# Altium integrated library Altium_PCB_Connector.IntLib: 246 symbols (part 4 of 5)
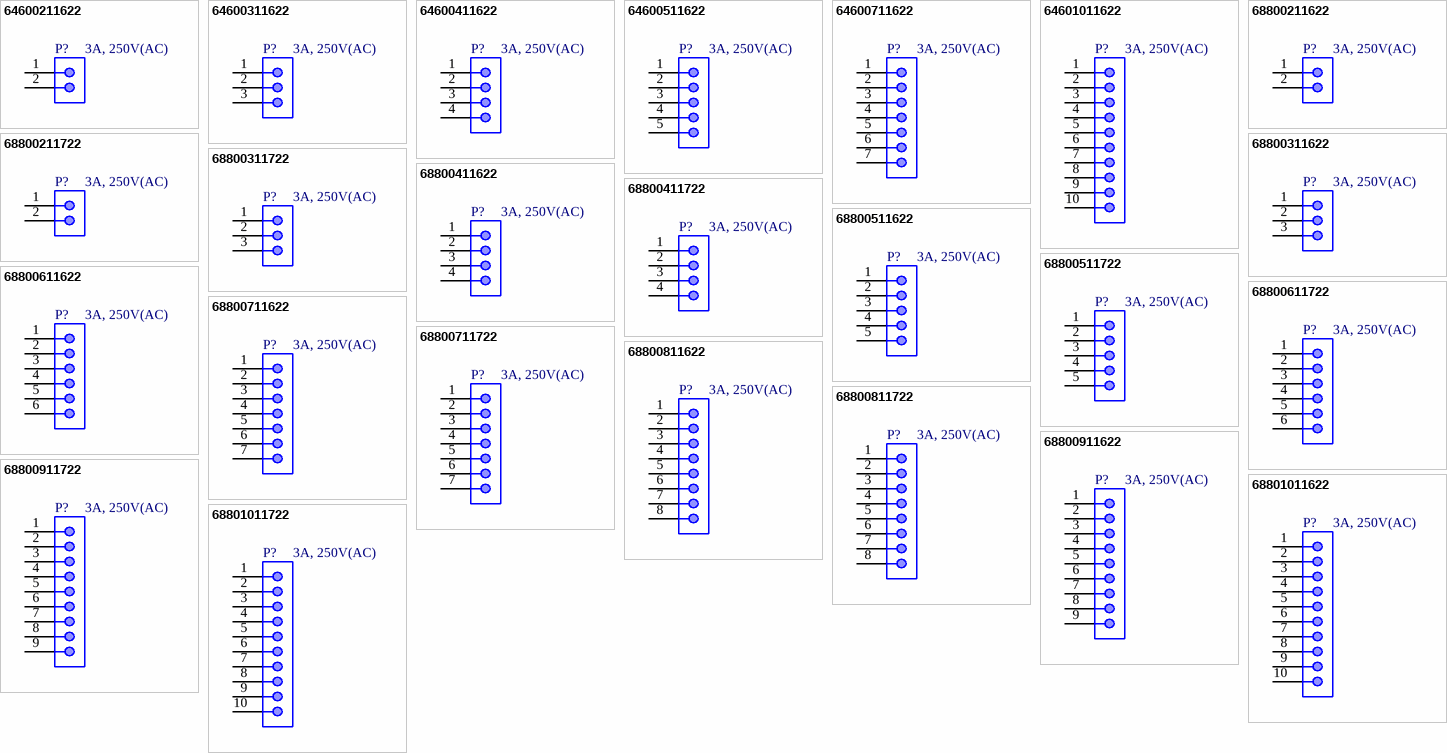
[diagram p12: symbols 64600211622 to 68801011722]

## 68800611622
designator P?, comment 3A, 250V(AC)
WR-WTB “J” Type THT Vertical Male Shrouded Header, pitch 2.5mm, 6p; Manufacturer: Wurth Elektronik; Manufacturer Part Number: 68800611622; Pin Number: 6; Contact Resistance: 20mOhm; Withstanding Voltage: 800VAC; Working Voltage: 250VAC; ComponentLink1Description: Datasheet; ComponentLink1URL: https://www.we-online.com/catalog/datasheet/68800611622.pdf; Pitch: 2.5mm; Packaging: Bag; Gender: Male; Type: Vertical; Rated Current: 3A; Supplier 1 URL: N/A; Supplier 2 URL: N/A; Supplier 3 URL: N/A; Value: 3A, 250V(AC); LCSC Part #: N/A; Mount: THT; Operating Temperature Max: + 85 C; Operating Temperature Min: - 25 C; Package / Case: 6; Supplier 1: Mouser; Supplier 1 Part Number: N/A; Supplier 2: Digi-Key; Supplier 2 Part Number: N/A; Supplier 3: thegioiic; Supplier 3 Part Number: N/A
footprint 68800611622
pins: 1, 2, 3, 4, 5, 6

## 68800611722
designator P?, comment 3A, 250V(AC)
WR-WTB “J” Type THT Male Horizontal Shrouded Header, pitch 2.5mm, 6p; Manufacturer: Wurth Elektronik; Manufacturer Part Number: 68800611722; Pin Number: 6; Contact Resistance: 20mOhm; Withstanding Voltage: 800VAC; Working Voltage: 250VAC; ComponentLink1Description: Datasheet; ComponentLink1URL: https://www.we-online.com/catalog/datasheet/68800611722.pdf; Pitch: 2.5mm; Packaging: Bag; Gender: Male; Type: Horizontal; Rated Current: 3A; Supplier 1 URL: N/A; Supplier 2 URL: N/A; Supplier 3 URL: N/A; Value: 3A, 250V(AC); LCSC Part #: N/A; Mount: THT; Operating Temperature Max: + 85 C; Operating Temperature Min: - 25 C; Package / Case: 6; Supplier 1: Mouser; Supplier 1 Part Number: N/A; Supplier 2: Digi-Key; Supplier 2 Part Number: N/A; Supplier 3: thegioiic; Supplier 3 Part Number: N/A
footprint 68800611722
pins: 1, 2, 3, 4, 5, 6

## 68800711622
designator P?, comment 3A, 250V(AC)
WR-WTB “J” Type THT Vertical Male Shrouded Header, pitch 2.5mm, 7p; Manufacturer: Wurth Elektronik; Manufacturer Part Number: 68800711622; Pin Number: 7; Contact Resistance: 20mOhm; Withstanding Voltage: 800VAC; Working Voltage: 250VAC; ComponentLink1Description: Datasheet; ComponentLink1URL: https://www.we-online.com/catalog/datasheet/68800711622.pdf; Pitch: 2.5mm; Packaging: Bag; Gender: Male; Type: Vertical; Rated Current: 3A; Supplier 1 URL: https://www.mouser.vn/ProductDetail/Wurth-Elektronik/68800711622?qs=3RJ0PdSuLVnWMCM6M3V0SA%3D%3D; Supplier 2 URL: N/A; Supplier 3 URL: N/A; Value: 3A, 250V(AC); LCSC Part #: N/A; Mount: THT; Operating Temperature Max: + 85 C; Operating Temperature Min: - 25 C; Package / Case: 7; Supplier 1: Mouser; Supplier 1 Part Number: 710-68800711622; Supplier 2: Digi-Key; Supplier 2 Part Number: N/A; Supplier 3: thegioiic; Supplier 3 Part Number: N/A
footprint 68800711622
pins: 1, 2, 3, 4, 5, 6, 7

## 68800711722
designator P?, comment 3A, 250V(AC)
WR-WTB “J” Type THT Male Horizontal Shrouded Header, pitch 2.5mm, 7p; Manufacturer: Wurth Elektronik; Manufacturer Part Number: 68800711722; Pin Number: 7; Contact Resistance: 20mOhm; Withstanding Voltage: 800VAC; Working Voltage: 250VAC; ComponentLink1Description: Datasheet; ComponentLink1URL: https://www.we-online.com/catalog/datasheet/68800711722.pdf; Pitch: 2.5mm; Packaging: Bag; Gender: Male; Type: Horizontal; Rated Current: 3A; Supplier 1 URL: N/A; Supplier 2 URL: N/A; Supplier 3 URL: N/A; Value: 3A, 250V(AC); LCSC Part #: N/A; Mount: THT; Operating Temperature Max: + 85 C; Operating Temperature Min: - 25 C; Package / Case: 7; Supplier 1: Mouser; Supplier 1 Part Number: N/A; Supplier 2: Digi-Key; Supplier 2 Part Number: N/A; Supplier 3: thegioiic; Supplier 3 Part Number: N/A
footprint 68800711722
pins: 1, 2, 3, 4, 5, 6, 7

## 68800811622
designator P?, comment 3A, 250V(AC)
WR-WTB “J” Type THT Vertical Male Shrouded Header, pitch 2.5mm, 8p; Manufacturer: Wurth Elektronik; Manufacturer Part Number: 68800811622; Pin Number: 8; Contact Resistance: 20mOhm; Withstanding Voltage: 800VAC; Working Voltage: 250VAC; ComponentLink1Description: Datasheet; ComponentLink1URL: https://www.we-online.com/catalog/datasheet/68800811622.pdf; Pitch: 2.5mm; Packaging: Bag; Gender: Male; Type: Vertical; Rated Current: 3A; Supplier 1 URL: N/A; Supplier 2 URL: N/A; Supplier 3 URL: N/A; Value: 3A, 250V(AC); LCSC Part #: N/A; Mount: THT; Operating Temperature Max: + 85 C; Operating Temperature Min: - 25 C; Package / Case: 8; Supplier 1: Mouser; Supplier 1 Part Number: N/A; Supplier 2: Digi-Key; Supplier 2 Part Number: N/A; Supplier 3: thegioiic; Supplier 3 Part Number: N/A
footprint 68800811622
pins: 1, 2, 3, 4, 5, 6, 7, 8

## 68800811722
designator P?, comment 3A, 250V(AC)
WR-WTB “J” Type THT Male Horizontal Shrouded Header, pitch 2.5mm, 8p; Manufacturer: Wurth Elektronik; Manufacturer Part Number: 68800811722; Pin Number: 8; Contact Resistance: 20mOhm; Withstanding Voltage: 800VAC; Working Voltage: 250VAC; ComponentLink1Description: Datasheet; ComponentLink1URL: https://www.we-online.com/catalog/datasheet/68800811722.pdf; Pitch: 2.5mm; Packaging: Bag; Gender: Male; Type: Horizontal; Rated Current: 3A; Supplier 1 URL: N/A; Supplier 2 URL: N/A; Supplier 3 URL: N/A; Value: 3A, 250V(AC); LCSC Part #: N/A; Mount: THT; Operating Temperature Max: + 85 C; Operating Temperature Min: - 25 C; Package / Case: 8; Supplier 1: Mouser; Supplier 1 Part Number: N/A; Supplier 2: Digi-Key; Supplier 2 Part Number: N/A; Supplier 3: thegioiic; Supplier 3 Part Number: N/A
footprint 68800811722
pins: 1, 2, 3, 4, 5, 6, 7, 8

## 68800911622
designator P?, comment 3A, 250V(AC)
WR-WTB “J” Type THT Vertical Male Shrouded Header, pitch 2.5mm, 9p; Manufacturer: Wurth Elektronik; Manufacturer Part Number: 68800911622; Pin Number: 9; Contact Resistance: 20mOhm; Withstanding Voltage: 800VAC; Working Voltage: 250VAC; ComponentLink1Description: Datasheet; ComponentLink1URL: https://www.we-online.com/catalog/datasheet/68800911622.pdf; Pitch: 2.5mm; Packaging: Bag; Gender: Male; Type: Vertical; Rated Current: 3A; Supplier 1 URL: N/A; Supplier 2 URL: N/A; Supplier 3 URL: N/A; Value: 3A, 250V(AC); LCSC Part #: N/A; Mount: THT; Operating Temperature Max: + 85 C; Operating Temperature Min: - 25 C; Package / Case: 9; Supplier 1: Mouser; Supplier 1 Part Number: N/A; Supplier 2: Digi-Key; Supplier 2 Part Number: N/A; Supplier 3: thegioiic; Supplier 3 Part Number: N/A
footprint 68800911622
pins: 1, 2, 3, 4, 5, 6, 7, 8, 9

## 68800911722
designator P?, comment 3A, 250V(AC)
WR-WTB “J” Type THT Male Horizontal Shrouded Header, pitch 2.5mm, 9p; Manufacturer: Wurth Elektronik; Manufacturer Part Number: 68800911722; Pin Number: 9; Contact Resistance: 20mOhm; Withstanding Voltage: 800VAC; Working Voltage: 250VAC; ComponentLink1Description: Datasheet; ComponentLink1URL: https://www.we-online.com/catalog/datasheet/68800911722.pdf; Pitch: 2.5mm; Packaging: Bag; Gender: Male; Type: Horizontal; Rated Current: 3A; Supplier 1 URL: N/A; Supplier 2 URL: N/A; Supplier 3 URL: N/A; Value: 3A, 250V(AC); LCSC Part #: N/A; Mount: THT; Operating Temperature Max: + 85 C; Operating Temperature Min: - 25 C; Package / Case: 9; Supplier 1: Mouser; Supplier 1 Part Number: N/A; Supplier 2: Digi-Key; Supplier 2 Part Number: N/A; Supplier 3: thegioiic; Supplier 3 Part Number: N/A
footprint 68800911722
pins: 1, 2, 3, 4, 5, 6, 7, 8, 9

## 68801011622
designator P?, comment 3A, 250V(AC)
WR-WTB “J” Type THT Vertical Male Shrouded Header, pitch 2.5mm, 10p; Manufacturer: Wurth Elektronik; Manufacturer Part Number: 68801011622; Pin Number: 10; Contact Resistance: 20mOhm; Withstanding Voltage: 800VAC; Working Voltage: 250VAC; ComponentLink1Description: Datasheet; ComponentLink1URL: https://www.we-online.com/catalog/datasheet/68801011622.pdf; Pitch: 2.5mm; Packaging: Bag; Gender: Male; Type: Vertical; Rated Current: 3A; Supplier 1 URL: N/A; Supplier 2 URL: N/A; Supplier 3 URL: N/A; Value: 3A, 250V(AC); LCSC Part #: N/A; Mount: THT; Operating Temperature Max: + 85 C; Operating Temperature Min: - 25 C; Package / Case: 10; Supplier 1: Mouser; Supplier 1 Part Number: N/A; Supplier 2: Digi-Key; Supplier 2 Part Number: N/A; Supplier 3: thegioiic; Supplier 3 Part Number: N/A
footprint 68801011622
pins: 1, 2, 3, 4, 5, 6, 7, 8, 9, 10

## 68801011722
designator P?, comment 3A, 250V(AC)
WR-WTB “J” Type THT Male Horizontal Shrouded Header, pitch 2.5mm, 10p; Manufacturer: Wurth Elektronik; Manufacturer Part Number: 68801011722; Pin Number: 10; Contact Resistance: 20mOhm; Withstanding Voltage: 800VAC; Working Voltage: 250VAC; ComponentLink1Description: Datasheet; ComponentLink1URL: https://www.we-online.com/catalog/datasheet/68801011722.pdf; Pitch: 2.5mm; Packaging: Bag; Gender: Male; Type: Horizontal; Rated Current: 3A; Supplier 1 URL: N/A; Supplier 2 URL: N/A; Supplier 3 URL: N/A; Value: 3A, 250V(AC); LCSC Part #: N/A; Mount: THT; Operating Temperature Max: + 85 C; Operating Temperature Min: - 25 C; Package / Case: 10; Supplier 1: Mouser; Supplier 1 Part Number: N/A; Supplier 2: Digi-Key; Supplier 2 Part Number: N/A; Supplier 3: thegioiic; Supplier 3 Part Number: N/A
footprint 68801011722
pins: 1, 2, 3, 4, 5, 6, 7, 8, 9, 10


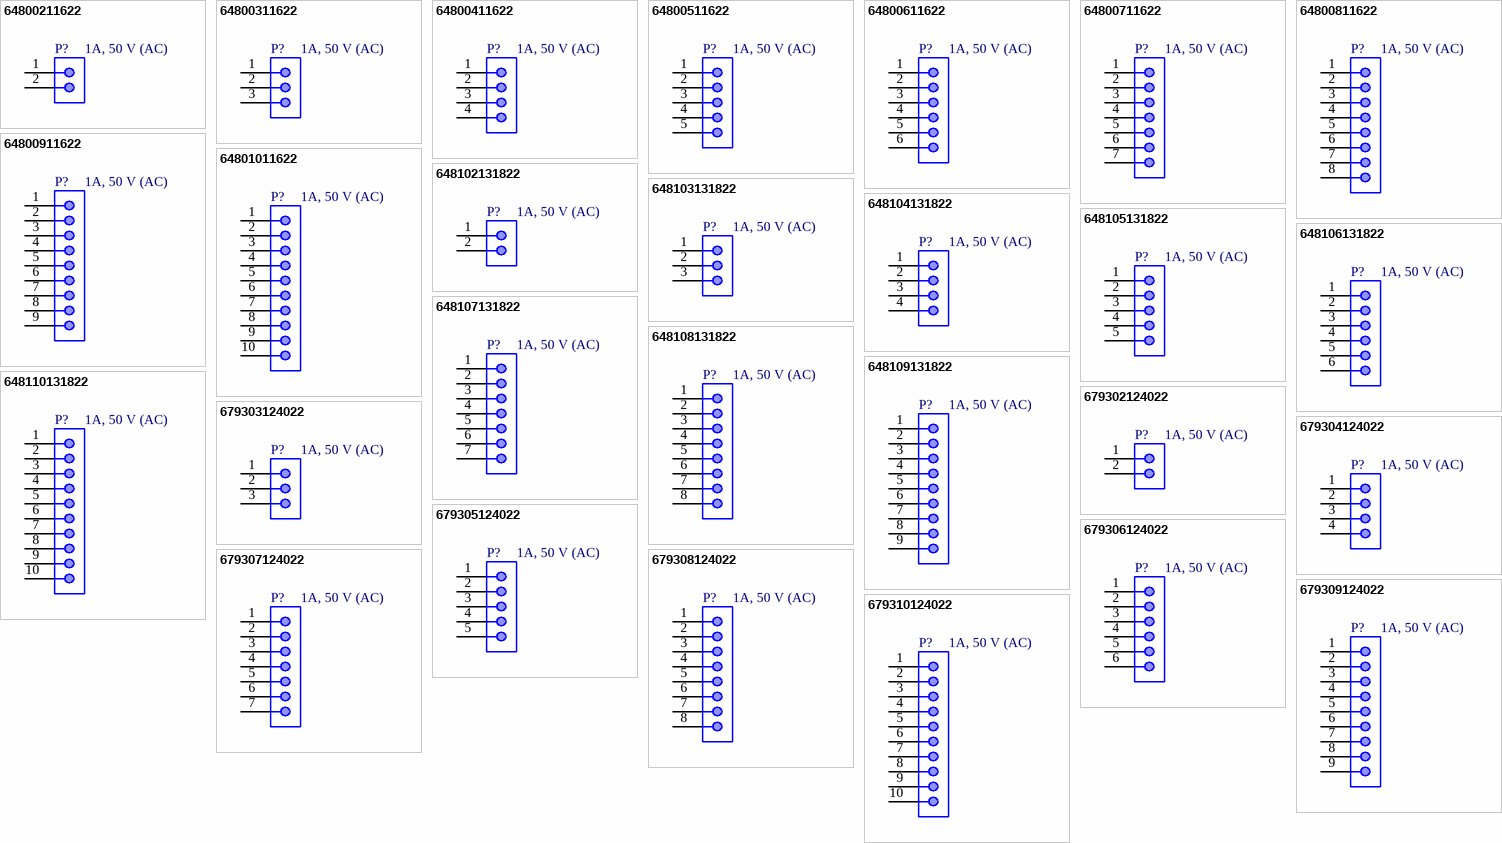
[diagram p6: symbols 64800211622 to 679310124022]

## 64800211622
designator P?, comment 1A, 50 V (AC)
WR-WTB THT Male Vertical Shrouded Header, pitch 1.5mm, 2p; Manufacturer: Wurth Elektronik; Manufacturer Part Number: 64800211622; Contact Resistance: 20mOhm; Withstanding Voltage: 500VAC; Working Voltage: 50VAC; ComponentLink1Description: Datasheet; ComponentLink1URL: https://www.we-online.com/catalog/datasheet/64800211622.pdf; Pitch: 1.5mm; Packaging: Bag; Gender: Male; Type: Vertical; Rated Current: 1A; Supplier 1 URL: N/A; Supplier 2 URL: N/A; Supplier 3 URL: N/A; Value: 1A, 50 V (AC); LCSC Part #: N/A; Mount: THT; Operating Temperature Max: + 85 C; Operating Temperature Min: - 25 C; Package / Case: 2; Supplier 1: Mouser; Supplier 1 Part Number: N/A; Supplier 2: Digi-Key; Supplier 2 Part Number: N/A; Supplier 3: thegioiic; Supplier 3 Part Number: N/A
footprint 64800211622
pins: 1, 2

## 64800311622
designator P?, comment 1A, 50 V (AC)
WR-WTB THT Male Vertical Shrouded Header, pitch 1.5mm, 3p; Manufacturer: Wurth Elektronik; Manufacturer Part Number: 64800311622; Contact Resistance: 20mOhm; Withstanding Voltage: 500VAC; Working Voltage: 50VAC; ComponentLink1Description: Datasheet; ComponentLink1URL: https://www.we-online.com/catalog/datasheet/64800311622.pdf; Pitch: 1.5mm; Packaging: Bag; Gender: Male; Type: Vertical; Rated Current: 1A; Supplier 1 URL: N/A; Supplier 2 URL: N/A; Supplier 3 URL: N/A; Value: 1A, 50 V (AC); LCSC Part #: N/A; Mount: THT; Operating Temperature Max: + 85 C; Operating Temperature Min: - 25 C; Package / Case: 3; Supplier 1: Mouser; Supplier 1 Part Number: N/A; Supplier 2: Digi-Key; Supplier 2 Part Number: N/A; Supplier 3: thegioiic; Supplier 3 Part Number: N/A
footprint 64800311622
pins: 1, 2, 3

## 64800411622
designator P?, comment 1A, 50 V (AC)
WR-WTB THT Male Vertical Shrouded Header, pitch 1.5mm, 4p; Manufacturer: Wurth Elektronik; Manufacturer Part Number: 64800411622; Contact Resistance: 20mOhm; Withstanding Voltage: 500VAC; Working Voltage: 50VAC; ComponentLink1Description: Datasheet; ComponentLink1URL: https://www.we-online.com/catalog/datasheet/64800411622.pdf; Pitch: 1.5mm; Packaging: Bag; Gender: Male; Type: Vertical; Rated Current: 1A; Supplier 1 URL: N/A; Supplier 2 URL: N/A; Supplier 3 URL: N/A; Value: 1A, 50 V (AC); LCSC Part #: N/A; Mount: THT; Operating Temperature Max: + 85 C; Operating Temperature Min: - 25 C; Package / Case: 4; Supplier 1: Mouser; Supplier 1 Part Number: N/A; Supplier 2: Digi-Key; Supplier 2 Part Number: N/A; Supplier 3: thegioiic; Supplier 3 Part Number: N/A
footprint 64800411622
pins: 1, 2, 3, 4

## 64800511622
designator P?, comment 1A, 50 V (AC)
WR-WTB THT Male Vertical Shrouded Header, pitch 1.5mm, 5p; Manufacturer: Wurth Elektronik; Manufacturer Part Number: 64800511622; Contact Resistance: 20mOhm; Withstanding Voltage: 500VAC; Working Voltage: 50VAC; ComponentLink1Description: Datasheet; ComponentLink1URL: https://www.we-online.com/catalog/datasheet/64800511622.pdf; Pitch: 1.5mm; Packaging: Bag; Gender: Male; Type: Vertical; Rated Current: 1A; Supplier 1 URL: N/A; Supplier 2 URL: N/A; Supplier 3 URL: N/A; Value: 1A, 50 V (AC); LCSC Part #: N/A; Mount: THT; Operating Temperature Max: + 85 C; Operating Temperature Min: - 25 C; Package / Case: 5; Supplier 1: Mouser; Supplier 1 Part Number: N/A; Supplier 2: Digi-Key; Supplier 2 Part Number: N/A; Supplier 3: thegioiic; Supplier 3 Part Number: N/A
footprint 64800511622
pins: 1, 2, 3, 4, 5

## 64800611622
designator P?, comment 1A, 50 V (AC)
WR-WTB THT Male Vertical Shrouded Header, pitch 1.5mm, 6p; Manufacturer: Wurth Elektronik; Manufacturer Part Number: 64800611622; Contact Resistance: 20mOhm; Withstanding Voltage: 500VAC; Working Voltage: 50VAC; ComponentLink1Description: Datasheet; ComponentLink1URL: https://www.we-online.com/catalog/datasheet/64800611622.pdf; Pitch: 1.5mm; Packaging: Bag; Gender: Male; Type: Vertical; Rated Current: 1A; Supplier 1 URL: N/A; Supplier 2 URL: N/A; Supplier 3 URL: N/A; Value: 1A, 50 V (AC); LCSC Part #: N/A; Mount: THT; Operating Temperature Max: + 85 C; Operating Temperature Min: - 25 C; Package / Case: 6; Supplier 1: Mouser; Supplier 1 Part Number: N/A; Supplier 2: Digi-Key; Supplier 2 Part Number: N/A; Supplier 3: thegioiic; Supplier 3 Part Number: N/A
footprint 64800611622
pins: 1, 2, 3, 4, 5, 6

## 64800711622
designator P?, comment 1A, 50 V (AC)
WR-WTB THT Male Vertical Shrouded Header, pitch 1.5mm, 7p; Manufacturer: Wurth Elektronik; Manufacturer Part Number: 64800711622; Contact Resistance: 20mOhm; Withstanding Voltage: 500VAC; Working Voltage: 50VAC; ComponentLink1Description: Datasheet; ComponentLink1URL: https://www.we-online.com/catalog/datasheet/64800711622.pdf; Pitch: 1.5mm; Packaging: Bag; Gender: Male; Type: Vertical; Rated Current: 1A; Supplier 1 URL: N/A; Supplier 2 URL: N/A; Supplier 3 URL: N/A; Value: 1A, 50 V (AC); LCSC Part #: N/A; Mount: THT; Operating Temperature Max: + 85 C; Operating Temperature Min: - 25 C; Package / Case: 7; Supplier 1: Mouser; Supplier 1 Part Number: N/A; Supplier 2: Digi-Key; Supplier 2 Part Number: N/A; Supplier 3: thegioiic; Supplier 3 Part Number: N/A
footprint 64800711622
pins: 1, 2, 3, 4, 5, 6, 7

## 64800811622
designator P?, comment 1A, 50 V (AC)
WR-WTB THT Male Vertical Shrouded Header, pitch 1.5mm, 8p; Manufacturer: Wurth Elektronik; Manufacturer Part Number: 64800811622; Contact Resistance: 20mOhm; Withstanding Voltage: 500VAC; Working Voltage: 50VAC; ComponentLink1Description: Datasheet; ComponentLink1URL: https://www.we-online.com/catalog/datasheet/64800811622.pdf; Pitch: 1.5mm; Packaging: Bag; Gender: Male; Type: Vertical; Rated Current: 1A; Supplier 1 URL: N/A; Supplier 2 URL: N/A; Supplier 3 URL: N/A; Value: 1A, 50 V (AC); LCSC Part #: N/A; Mount: THT; Operating Temperature Max: + 85 C; Operating Temperature Min: - 25 C; Package / Case: 8; Supplier 1: Mouser; Supplier 1 Part Number: N/A; Supplier 2: Digi-Key; Supplier 2 Part Number: N/A; Supplier 3: thegioiic; Supplier 3 Part Number: N/A
footprint 64800811622
pins: 1, 2, 3, 4, 5, 6, 7, 8

## 64800911622
designator P?, comment 1A, 50 V (AC)
WR-WTB THT Male Vertical Shrouded Header, pitch 1.5mm, 9p; Manufacturer: Wurth Elektronik; Manufacturer Part Number: 64800911622; Contact Resistance: 20mOhm; Withstanding Voltage: 500VAC; Working Voltage: 50VAC; ComponentLink1Description: Datasheet; ComponentLink1URL: https://www.we-online.com/catalog/datasheet/64800911622.pdf; Pitch: 1.5mm; Packaging: Bag; Gender: Male; Type: Vertical; Rated Current: 1A; Supplier 1 URL: N/A; Supplier 2 URL: N/A; Supplier 3 URL: N/A; Value: 1A, 50 V (AC); LCSC Part #: N/A; Mount: THT; Operating Temperature Max: + 85 C; Operating Temperature Min: - 25 C; Package / Case: 9; Supplier 1: Mouser; Supplier 1 Part Number: N/A; Supplier 2: Digi-Key; Supplier 2 Part Number: N/A; Supplier 3: thegioiic; Supplier 3 Part Number: N/A
footprint 64800911622
pins: 1, 2, 3, 4, 5, 6, 7, 8, 9

## 64801011622
designator P?, comment 1A, 50 V (AC)
WR-WTB THT Male Vertical Shrouded Header, pitch 1.5mm, 10p; Manufacturer: Wurth Elektronik; Manufacturer Part Number: 64801011622; Contact Resistance: 20mOhm; Withstanding Voltage: 500VAC; Working Voltage: 50VAC; ComponentLink1Description: Datasheet; ComponentLink1URL: https://www.we-online.com/catalog/datasheet/64801011622.pdf; Pitch: 1.5mm; Packaging: Bag; Gender: Male; Type: Vertical; Rated Current: 1A; Supplier 1 URL: N/A; Supplier 2 URL: N/A; Supplier 3 URL: N/A; Value: 1A, 50 V (AC); LCSC Part #: N/A; Mount: THT; Operating Temperature Max: + 85 C; Operating Temperature Min: - 25 C; Package / Case: 10; Supplier 1: Mouser; Supplier 1 Part Number: N/A; Supplier 2: Digi-Key; Supplier 2 Part Number: N/A; Supplier 3: thegioiic; Supplier 3 Part Number: N/A
footprint 64801011622
pins: 1, 2, 3, 4, 5, 6, 7, 8, 9, 10

## 648102131822
designator P?, comment 1A, 50 V (AC)
WR-WTB SMT Male Horizontal Shrouded Header, pitch 1.5mm, 2p; Manufacturer: Wurth Elektronik; Manufacturer Part Number: 648102131822; Contact Resistance: 20mOhm; Withstanding Voltage: 500VAC; Working Voltage: 50VAC; ComponentLink1Description: Datasheet; ComponentLink1URL: https://www.we-online.com/catalog/datasheet/648102131822.pdf; Pitch: 1.5mm; Packaging: Tape and Reel; Gender: Male; Type: Horizontal; Rated Current: 1A; Supplier 1 URL: https://www.mouser.vn/ProductDetail/Wurth-Elektronik/648102131822?qs=ZtY9WdtwX54lEWs6ByaENA%3D%3D; Supplier 2 URL: N/A; Supplier 3 URL: N/A; Value: 1A, 50 V (AC); LCSC Part #: N/A; Mount: SMD/SMT; Operating Temperature Max: + 85 C; Operating Temperature Min: - 25 C; Package / Case: 2; Supplier 1: Mouser; Supplier 1 Part Number: 710-648102131822; Supplier 2: Digi-Key; Supplier 2 Part Number: N/A; Supplier 3: thegioiic; Supplier 3 Part Number: N/A
footprint 648102131822
pins: 1, 2

## 648103131822
designator P?, comment 1A, 50 V (AC)
WR-WTB SMT Male Horizontal Shrouded Header, pitch 1.5mm, 3p; Manufacturer: Wurth Elektronik; Manufacturer Part Number: 648103131822; Contact Resistance: 20mOhm; Withstanding Voltage: 500VAC; Working Voltage: 50VAC; ComponentLink1Description: Datasheet; ComponentLink1URL: https://www.we-online.com/catalog/datasheet/648103131822.pdf; Pitch: 1.5mm; Packaging: Tape and Reel; Gender: Male; Type: Horizontal; Rated Current: 1A; Supplier 1 URL: https://www.mouser.vn/ProductDetail/Wurth-Elektronik/648103131822?qs=W%252B2sBeLta1Z1VTNSRU75xA%3D%3D; Supplier 2 URL: N/A; Supplier 3 URL: N/A; Value: 1A, 50 V (AC); LCSC Part #: N/A; Mount: SMD/SMT; Operating Temperature Max: + 85 C; Operating Temperature Min: - 25 C; Package / Case: 3; Supplier 1: Mouser; Supplier 1 Part Number: 710-648103131822; Supplier 2: Digi-Key; Supplier 2 Part Number: N/A; Supplier 3: thegioiic; Supplier 3 Part Number: N/A
footprint 648103131822
pins: 1, 2, 3

## 648104131822
designator P?, comment 1A, 50 V (AC)
WR-WTB SMT Male Horizontal Shrouded Header, pitch 1.5mm, 4p; Manufacturer: Wurth Elektronik; Manufacturer Part Number: 648104131822; Contact Resistance: 20mOhm; Withstanding Voltage: 500VAC; Working Voltage: 50VAC; ComponentLink1Description: Datasheet; ComponentLink1URL: https://www.we-online.com/catalog/datasheet/648104131822.pdf; Pitch: 1.5mm; Packaging: Tape and Reel; Gender: Male; Type: Horizontal; Rated Current: 1A; Supplier 1 URL: https://www.mouser.vn/ProductDetail/Wurth-Elektronik/648104131822?qs=ZtY9WdtwX57XPjIMVYKZ6w%3D%3D; Supplier 2 URL: N/A; Supplier 3 URL: N/A; Value: 1A, 50 V (AC); LCSC Part #: N/A; Mount: SMD/SMT; Operating Temperature Max: + 85 C; Operating Temperature Min: - 25 C; Package / Case: 4; Supplier 1: Mouser; Supplier 1 Part Number: 710-648104131822; Supplier 2: Digi-Key; Supplier 2 Part Number: N/A; Supplier 3: thegioiic; Supplier 3 Part Number: N/A
footprint 648104131822
pins: 1, 2, 3, 4

## 648105131822
designator P?, comment 1A, 50 V (AC)
WR-WTB SMT Male Horizontal Shrouded Header, pitch 1.5mm, 5p; Manufacturer: Wurth Elektronik; Manufacturer Part Number: 648105131822; Contact Resistance: 20mOhm; Withstanding Voltage: 500VAC; Working Voltage: 50VAC; ComponentLink1Description: Datasheet; ComponentLink1URL: https://www.we-online.com/catalog/datasheet/648105131822.pdf; Pitch: 1.5mm; Packaging: Tape and Reel; Gender: Male; Type: Horizontal; Rated Current: 1A; Supplier 1 URL: https://www.mouser.vn/ProductDetail/Wurth-Elektronik/648105131822?qs=ZtY9WdtwX57xcCc%252BOvDCvA%3D%3D; Supplier 2 URL: N/A; Supplier 3 URL: N/A; Value: 1A, 50 V (AC); LCSC Part #: N/A; Mount: SMD/SMT; Operating Temperature Max: + 85 C; Operating Temperature Min: - 25 C; Package / Case: 5; Supplier 1: Mouser; Supplier 1 Part Number: 710-648105131822; Supplier 2: Digi-Key; Supplier 2 Part Number: N/A; Supplier 3: thegioiic; Supplier 3 Part Number: N/A
footprint 648105131822
pins: 1, 2, 3, 4, 5

## 648106131822
designator P?, comment 1A, 50 V (AC)
WR-WTB SMT Male Horizontal Shrouded Header, pitch 1.5mm, 6p; Manufacturer: Wurth Elektronik; Manufacturer Part Number: 648106131822; Contact Resistance: 20mOhm; Withstanding Voltage: 500VAC; Working Voltage: 50VAC; ComponentLink1Description: Datasheet; ComponentLink1URL: https://www.we-online.com/catalog/datasheet/648106131822.pdf; Pitch: 1.5mm; Packaging: Tape and Reel; Gender: Male; Type: Horizontal; Rated Current: 1A; Supplier 1 URL: N/A; Supplier 2 URL: N/A; Supplier 3 URL: N/A; Value: 1A, 50 V (AC); LCSC Part #: N/A; Mount: SMD/SMT; Operating Temperature Max: + 85 C; Operating Temperature Min: - 25 C; Package / Case: 6; Supplier 1: Mouser; Supplier 1 Part Number: N/A; Supplier 2: Digi-Key; Supplier 2 Part Number: N/A; Supplier 3: thegioiic; Supplier 3 Part Number: N/A
footprint 648106131822
pins: 1, 2, 3, 4, 5, 6

## 648107131822
designator P?, comment 1A, 50 V (AC)
WR-WTB SMT Male Horizontal Shrouded Header, pitch 1.5mm, 7p; Manufacturer: Wurth Elektronik; Manufacturer Part Number: 648107131822; Contact Resistance: 20mOhm; Withstanding Voltage: 500VAC; Working Voltage: 50VAC; ComponentLink1Description: Datasheet; ComponentLink1URL: https://www.we-online.com/catalog/datasheet/648107131822.pdf; Pitch: 1.5mm; Packaging: Tape and Reel; Gender: Male; Type: Horizontal; Rated Current: 1A; Supplier 1 URL: N/A; Supplier 2 URL: N/A; Supplier 3 URL: N/A; Value: 1A, 50 V (AC); LCSC Part #: N/A; Mount: SMD/SMT; Operating Temperature Max: + 85 C; Operating Temperature Min: - 25 C; Package / Case: 7; Supplier 1: Mouser; Supplier 1 Part Number: N/A; Supplier 2: Digi-Key; Supplier 2 Part Number: N/A; Supplier 3: thegioiic; Supplier 3 Part Number: N/A
footprint 648107131822
pins: 1, 2, 3, 4, 5, 6, 7

## 648108131822
designator P?, comment 1A, 50 V (AC)
WR-WTB SMT Male Horizontal Shrouded Header, pitch 1.5mm, 8p; Manufacturer: Wurth Elektronik; Manufacturer Part Number: 648108131822; Contact Resistance: 20mOhm; Withstanding Voltage: 500VAC; Working Voltage: 50VAC; ComponentLink1Description: Datasheet; ComponentLink1URL: https://www.we-online.com/catalog/datasheet/648108131822.pdf; Pitch: 1.5mm; Packaging: Tape and Reel; Gender: Male; Type: Horizontal; Rated Current: 1A; Supplier 1 URL: N/A; Supplier 2 URL: N/A; Supplier 3 URL: N/A; Value: 1A, 50 V (AC); LCSC Part #: N/A; Mount: SMD/SMT; Operating Temperature Max: + 85 C; Operating Temperature Min: - 25 C; Package / Case: 8; Supplier 1: Mouser; Supplier 1 Part Number: N/A; Supplier 2: Digi-Key; Supplier 2 Part Number: N/A; Supplier 3: thegioiic; Supplier 3 Part Number: N/A
footprint 648108131822
pins: 1, 2, 3, 4, 5, 6, 7, 8

## 648109131822
designator P?, comment 1A, 50 V (AC)
WR-WTB SMT Male Horizontal Shrouded Header, pitch 1.5mm, 9p; Manufacturer: Wurth Elektronik; Manufacturer Part Number: 648109131822; Contact Resistance: 20mOhm; Withstanding Voltage: 500VAC; Working Voltage: 50VAC; ComponentLink1Description: Datasheet; ComponentLink1URL: https://www.we-online.com/catalog/datasheet/648109131822.pdf; Pitch: 1.5mm; Packaging: Tape and Reel; Gender: Male; Type: Horizontal; Rated Current: 1A; Supplier 1 URL: N/A; Supplier 2 URL: N/A; Supplier 3 URL: N/A; Value: 1A, 50 V (AC); LCSC Part #: N/A; Mount: SMD/SMT; Operating Temperature Max: + 85 C; Operating Temperature Min: - 25 C; Package / Case: 9; Supplier 1: Mouser; Supplier 1 Part Number: N/A; Supplier 2: Digi-Key; Supplier 2 Part Number: N/A; Supplier 3: thegioiic; Supplier 3 Part Number: N/A
footprint 648109131822
pins: 1, 2, 3, 4, 5, 6, 7, 8, 9

## 648110131822
designator P?, comment 1A, 50 V (AC)
WR-WTB SMT Male Horizontal Shrouded Header, pitch 1.5mm, 10p; Manufacturer: Wurth Elektronik; Manufacturer Part Number: 648110131822; Contact Resistance: 20mOhm; Withstanding Voltage: 500VAC; Working Voltage: 50VAC; ComponentLink1Description: Datasheet; ComponentLink1URL: https://www.we-online.com/catalog/datasheet/648110131822.pdf; Pitch: 1.5mm; Packaging: Tape and Reel; Gender: Male; Type: Horizontal; Rated Current: 1A; Supplier 1 URL: N/A; Supplier 2 URL: N/A; Supplier 3 URL: N/A; Value: 1A, 50 V (AC); LCSC Part #: N/A; Mount: SMD/SMT; Operating Temperature Max: + 85 C; Operating Temperature Min: - 25 C; Package / Case: 10; Supplier 1: Mouser; Supplier 1 Part Number: N/A; Supplier 2: Digi-Key; Supplier 2 Part Number: N/A; Supplier 3: thegioiic; Supplier 3 Part Number: N/A
footprint 648110131822
pins: 1, 2, 3, 4, 5, 6, 7, 8, 9, 10

## 679302124022
designator P?, comment 1A, 50 V (AC)
WR-WTB SMT Male Vertical Shrouded Header, pitch 1.5mm, 2p; Manufacturer: Wurth Elektronik; Manufacturer Part Number: 679302124022; Contact Resistance: 20mOhm; Withstanding Voltage: 500VAC; Working Voltage: 50VAC; ComponentLink1Description: Datasheet; ComponentLink1URL: https://www.we-online.com/catalog/datasheet/679302124022.pdf; Pitch: 1.5mm; Packaging: Tape and Reel; Gender: Male; Type: Vertical; Rated Current: 1A; Supplier 1 URL: https://www.mouser.vn/ProductDetail/Wurth-Elektronik/679302124022?qs=ZtY9WdtwX57sAKkLBaRkmA%3D%3D; Supplier 2 URL: N/A; Supplier 3 URL: N/A; Value: 1A, 50 V (AC); LCSC Part #: N/A; Mount: SMD/SMT; Operating Temperature Max: + 85 C; Operating Temperature Min: - 25 C; Package / Case: 2; Supplier 1: Mouser; Supplier 1 Part Number: 710-679302124022; Supplier 2: Digi-Key; Supplier 2 Part Number: N/A; Supplier 3: thegioiic; Supplier 3 Part Number: N/A
footprint 679302124022
pins: 1, 2

## 679303124022
designator P?, comment 1A, 50 V (AC)
WR-WTB SMT Male Vertical Shrouded Header, pitch 1.5mm, 3p; Manufacturer: Wurth Elektronik; Manufacturer Part Number: 679303124022; Contact Resistance: 20mOhm; Withstanding Voltage: 500VAC; Working Voltage: 50VAC; ComponentLink1Description: Datasheet; ComponentLink1URL: https://www.we-online.com/catalog/datasheet/679303124022.pdf; Pitch: 1.5mm; Packaging: Tape and Reel; Gender: Male; Type: Vertical; Rated Current: 1A; Supplier 1 URL: https://www.mouser.vn/ProductDetail/Wurth-Elektronik/679303124022?qs=W%252B2sBeLta1b80729RqVUew%3D%3D; Supplier 2 URL: N/A; Supplier 3 URL: N/A; Value: 1A, 50 V (AC); LCSC Part #: N/A; Mount: SMD/SMT; Operating Temperature Max: + 85 C; Operating Temperature Min: - 25 C; Package / Case: 3; Supplier 1: Mouser; Supplier 1 Part Number: 710-679303124022; Supplier 2: Digi-Key; Supplier 2 Part Number: N/A; Supplier 3: thegioiic; Supplier 3 Part Number: N/A
footprint 679303124022
pins: 1, 2, 3

## 679304124022
designator P?, comment 1A, 50 V (AC)
WR-WTB SMT Male Vertical Shrouded Header, pitch 1.5mm, 4p; Manufacturer: Wurth Elektronik; Manufacturer Part Number: 679304124022; Contact Resistance: 20mOhm; Withstanding Voltage: 500VAC; Working Voltage: 50VAC; ComponentLink1Description: Datasheet; ComponentLink1URL: https://www.we-online.com/catalog/datasheet/679304124022.pdf; Pitch: 1.5mm; Packaging: Tape and Reel; Gender: Male; Type: Vertical; Rated Current: 1A; Supplier 1 URL: https://www.mouser.vn/ProductDetail/Wurth-Elektronik/679304124022?qs=ZtY9WdtwX549lrnHoORd6w%3D%3D; Supplier 2 URL: N/A; Supplier 3 URL: N/A; Value: 1A, 50 V (AC); LCSC Part #: N/A; Mount: SMD/SMT; Operating Temperature Max: + 85 C; Operating Temperature Min: - 25 C; Package / Case: 4; Supplier 1: Mouser; Supplier 1 Part Number: 710-679304124022; Supplier 2: Digi-Key; Supplier 2 Part Number: N/A; Supplier 3: thegioiic; Supplier 3 Part Number: N/A
footprint 679304124022
pins: 1, 2, 3, 4

## 679305124022
designator P?, comment 1A, 50 V (AC)
WR-WTB SMT Male Vertical Shrouded Header, pitch 1.5mm, 5p; Manufacturer: Wurth Elektronik; Manufacturer Part Number: 679305124022; Contact Resistance: 20mOhm; Withstanding Voltage: 500VAC; Working Voltage: 50VAC; ComponentLink1Description: Datasheet; ComponentLink1URL: https://www.we-online.com/catalog/datasheet/679305124022.pdf; Pitch: 1.5mm; Packaging: Tape and Reel; Gender: Male; Type: Vertical; Rated Current: 1A; Supplier 1 URL: https://www.mouser.vn/ProductDetail/Wurth-Elektronik/679305124022?qs=ZtY9WdtwX5433N6c7YZdTw%3D%3D; Supplier 2 URL: N/A; Supplier 3 URL: N/A; Value: 1A, 50 V (AC); LCSC Part #: N/A; Mount: SMD/SMT; Operating Temperature Max: + 85 C; Operating Temperature Min: - 25 C; Package / Case: 5; Supplier 1: Mouser; Supplier 1 Part Number: 710-679305124022; Supplier 2: Digi-Key; Supplier 2 Part Number: N/A; Supplier 3: thegioiic; Supplier 3 Part Number: N/A
footprint 679305124022
pins: 1, 2, 3, 4, 5

## 679306124022
designator P?, comment 1A, 50 V (AC)
WR-WTB SMT Male Vertical Shrouded Header, pitch 1.5mm, 6p; Manufacturer: Wurth Elektronik; Manufacturer Part Number: 679306124022; Contact Resistance: 20mOhm; Withstanding Voltage: 500VAC; Working Voltage: 50VAC; ComponentLink1Description: Datasheet; ComponentLink1URL: https://www.we-online.com/catalog/datasheet/679306124022.pdf; Pitch: 1.5mm; Packaging: Tape and Reel; Gender: Male; Type: Vertical; Rated Current: 1A; Supplier 1 URL: N/A; Supplier 2 URL: N/A; Supplier 3 URL: N/A; Value: 1A, 50 V (AC); LCSC Part #: N/A; Mount: SMD/SMT; Operating Temperature Max: + 85 C; Operating Temperature Min: - 25 C; Package / Case: 6; Supplier 1: Mouser; Supplier 1 Part Number: N/A; Supplier 2: Digi-Key; Supplier 2 Part Number: N/A; Supplier 3: thegioiic; Supplier 3 Part Number: N/A
footprint 679306124022
pins: 1, 2, 3, 4, 5, 6

## 679307124022
designator P?, comment 1A, 50 V (AC)
WR-WTB SMT Male Vertical Shrouded Header, pitch 1.5mm, 7p; Manufacturer: Wurth Elektronik; Manufacturer Part Number: 679307124022; Contact Resistance: 20mOhm; Withstanding Voltage: 500VAC; Working Voltage: 50VAC; ComponentLink1Description: Datasheet; ComponentLink1URL: https://www.we-online.com/catalog/datasheet/679307124022.pdf; Pitch: 1.5mm; Packaging: Tape and Reel; Gender: Male; Type: Vertical; Rated Current: 1A; Supplier 1 URL: N/A; Supplier 2 URL: N/A; Supplier 3 URL: N/A; Value: 1A, 50 V (AC); LCSC Part #: N/A; Mount: SMD/SMT; Operating Temperature Max: + 85 C; Operating Temperature Min: - 25 C; Package / Case: 7; Supplier 1: Mouser; Supplier 1 Part Number: N/A; Supplier 2: Digi-Key; Supplier 2 Part Number: N/A; Supplier 3: thegioiic; Supplier 3 Part Number: N/A
footprint 679307124022
pins: 1, 2, 3, 4, 5, 6, 7

## 679308124022
designator P?, comment 1A, 50 V (AC)
WR-WTB SMT Male Vertical Shrouded Header, pitch 1.5mm, 8p; Manufacturer: Wurth Elektronik; Manufacturer Part Number: 679308124022; Contact Resistance: 20mOhm; Withstanding Voltage: 500VAC; Working Voltage: 50VAC; ComponentLink1Description: Datasheet; ComponentLink1URL: https://www.we-online.com/catalog/datasheet/679308124022.pdf; Pitch: 1.5mm; Packaging: Tape and Reel; Gender: Male; Type: Vertical; Rated Current: 1A; Supplier 1 URL: N/A; Supplier 2 URL: N/A; Supplier 3 URL: N/A; Value: 1A, 50 V (AC); LCSC Part #: N/A; Mount: SMD/SMT; Operating Temperature Max: + 85 C; Operating Temperature Min: - 25 C; Package / Case: 8; Supplier 1: Mouser; Supplier 1 Part Number: N/A; Supplier 2: Digi-Key; Supplier 2 Part Number: N/A; Supplier 3: thegioiic; Supplier 3 Part Number: N/A
footprint 679308124022
pins: 1, 2, 3, 4, 5, 6, 7, 8

## 679309124022
designator P?, comment 1A, 50 V (AC)
WR-WTB SMT Male Vertical Shrouded Header, pitch 1.5mm, 9p; Manufacturer: Wurth Elektronik; Manufacturer Part Number: 679309124022; Contact Resistance: 20mOhm; Withstanding Voltage: 500VAC; Working Voltage: 50VAC; ComponentLink1Description: Datasheet; ComponentLink1URL: https://www.we-online.com/catalog/datasheet/679309124022.pdf; Pitch: 1.5mm; Packaging: Tape and Reel; Gender: Male; Type: Vertical; Rated Current: 1A; Supplier 1 URL: N/A; Supplier 2 URL: N/A; Supplier 3 URL: N/A; Value: 1A, 50 V (AC); LCSC Part #: N/A; Mount: SMD/SMT; Operating Temperature Max: + 85 C; Operating Temperature Min: - 25 C; Package / Case: 9; Supplier 1: Mouser; Supplier 1 Part Number: N/A; Supplier 2: Digi-Key; Supplier 2 Part Number: N/A; Supplier 3: thegioiic; Supplier 3 Part Number: N/A
footprint 679309124022
pins: 1, 2, 3, 4, 5, 6, 7, 8, 9

## 679310124022
designator P?, comment 1A, 50 V (AC)
WR-WTB SMT Male Vertical Shrouded Header, pitch 1.5mm, 10p; Manufacturer: Wurth Elektronik; Manufacturer Part Number: 679310124022; Contact Resistance: 20mOhm; Withstanding Voltage: 500VAC; Working Voltage: 50VAC; ComponentLink1Description: Datasheet; ComponentLink1URL: https://www.we-online.com/catalog/datasheet/679310124022.pdf; Pitch: 1.5mm; Packaging: Tape and Reel; Gender: Male; Type: Vertical; Rated Current: 1A; Supplier 1 URL: N/A; Supplier 2 URL: N/A; Supplier 3 URL: N/A; Value: 1A, 50 V (AC); LCSC Part #: N/A; Mount: SMD/SMT; Operating Temperature Max: + 85 C; Operating Temperature Min: - 25 C; Package / Case: 10; Supplier 1: Mouser; Supplier 1 Part Number: N/A; Supplier 2: Digi-Key; Supplier 2 Part Number: N/A; Supplier 3: thegioiic; Supplier 3 Part Number: N/A
footprint 679310124022
pins: 1, 2, 3, 4, 5, 6, 7, 8, 9, 10


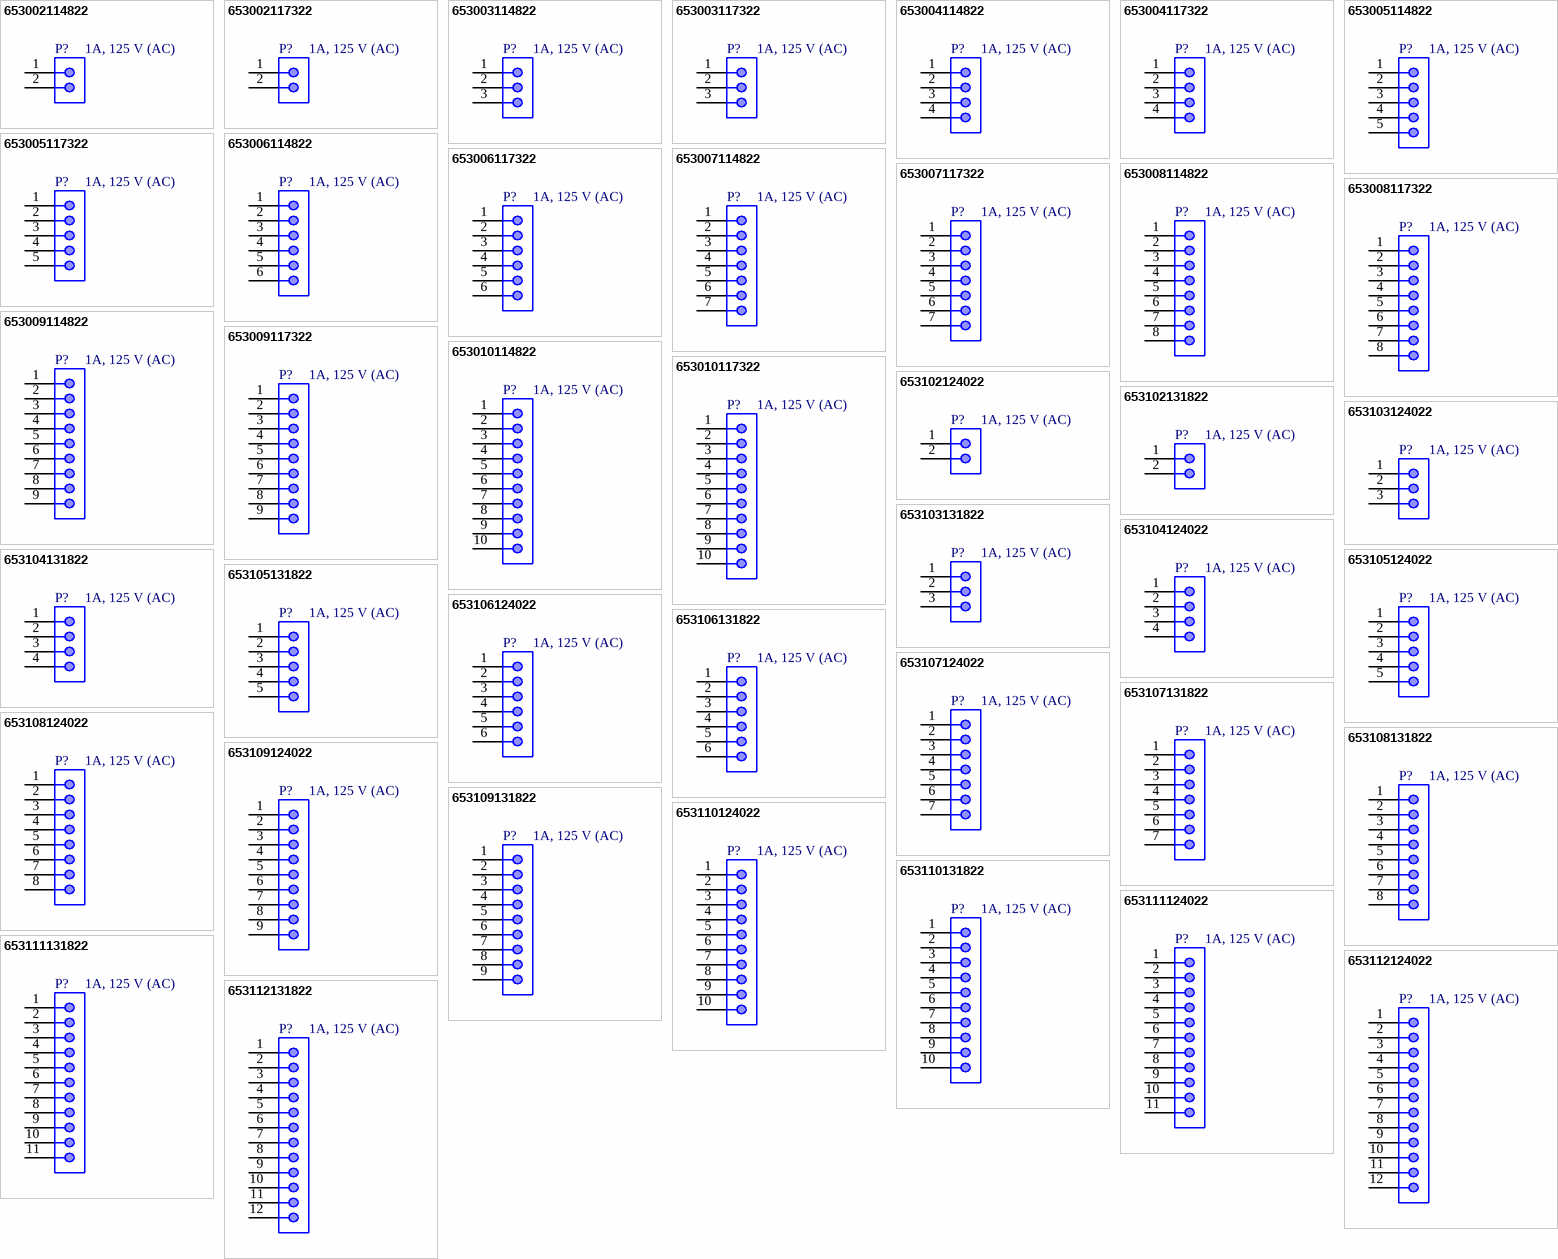
[diagram p7: symbols 653002114822 to 653112131822]

## 653002114822
designator P?, comment 1A, 125 V (AC)
WR-WTB THT Male Vertical Shrouded Header, pitch 1.25mm, 2p; Manufacturer: Wurth Elektronik; Manufacturer Part Number: 653002114822; Pin Number: 2; Contact Resistance: 20mOhm; Withstanding Voltage: 250VAC; Working Voltage: 125VAC; ComponentLink1Description: Datasheet; ComponentLink1URL: https://www.we-online.com/catalog/datasheet/653002114822.pdf; Pitch: 1.25mm; Packaging: Bag; Gender: Male; Type: Vertical; Rated Current: 1A; Supplier 1 URL: N/A; Supplier 2 URL: N/A; Supplier 3 URL: N/A; Value: 1A, 125 V (AC); LCSC Part #: N/A; Mount: THT; Operating Temperature Max: + 85 C; Operating Temperature Min: - 40 C; Package / Case: 2; Supplier 1: Mouser; Supplier 1 Part Number: N/A; Supplier 2: Digi-Key; Supplier 2 Part Number: N/A; Supplier 3: thegioiic; Supplier 3 Part Number: N/A
footprint 653002114822
pins: 1, 2

## 653002117322
designator P?, comment 1A, 125 V (AC)
WR-WTB THT Male Horizontal Shrouded Header, pitch 1.25mm, 2p; Manufacturer: Wurth Elektronik; Manufacturer Part Number: 653002117322; Pin Number: 2; Contact Resistance: 20mOhm; Withstanding Voltage: 250VAC; Working Voltage: 125VAC; ComponentLink1Description: Datasheet; ComponentLink1URL: https://www.we-online.com/catalog/datasheet/653002117322.pdf; Pitch: 1.25mm; Packaging: Tube; Gender: Male; Type: Horizontal; Rated Current: 1A; Supplier 1 URL: N/A; Supplier 2 URL: N/A; Supplier 3 URL: N/A; Value: 1A, 125 V (AC); LCSC Part #: N/A; Mount: THT; Operating Temperature Max: + 85 C; Operating Temperature Min: - 40 C; Package / Case: 2; Supplier 1: Mouser; Supplier 1 Part Number: N/A; Supplier 2: Digi-Key; Supplier 2 Part Number: N/A; Supplier 3: thegioiic; Supplier 3 Part Number: N/A
footprint 653002117322
pins: 1, 2

## 653003114822
designator P?, comment 1A, 125 V (AC)
WR-WTB THT Male Vertical Shrouded Header, pitch 1.25mm, 3p; Manufacturer: Wurth Elektronik; Manufacturer Part Number: 653003114822; Pin Number: 3; Contact Resistance: 20mOhm; Withstanding Voltage: 250VAC; Working Voltage: 125VAC; ComponentLink1Description: Datasheet; ComponentLink1URL: https://www.we-online.com/catalog/datasheet/653003114822.pdf; Pitch: 1.25mm; Packaging: Bag; Gender: Male; Type: Vertical; Rated Current: 1A; Supplier 1 URL: N/A; Supplier 2 URL: N/A; Supplier 3 URL: N/A; Value: 1A, 125 V (AC); LCSC Part #: N/A; Mount: THT; Operating Temperature Max: + 85 C; Operating Temperature Min: - 40 C; Package / Case: 3; Supplier 1: Mouser; Supplier 1 Part Number: N/A; Supplier 2: Digi-Key; Supplier 2 Part Number: N/A; Supplier 3: thegioiic; Supplier 3 Part Number: N/A
footprint 653003114822
pins: 1, 2, 3

## 653003117322
designator P?, comment 1A, 125 V (AC)
WR-WTB THT Male Horizontal Shrouded Header, pitch 1.25mm, 3p; Manufacturer: Wurth Elektronik; Manufacturer Part Number: 653003117322; Pin Number: 3; Contact Resistance: 20mOhm; Withstanding Voltage: 250VAC; Working Voltage: 125VAC; ComponentLink1Description: Datasheet; ComponentLink1URL: https://www.we-online.com/catalog/datasheet/653003117322.pdf; Pitch: 1.25mm; Packaging: Tube; Gender: Male; Type: Horizontal; Rated Current: 1A; Supplier 1 URL: N/A; Supplier 2 URL: N/A; Supplier 3 URL: N/A; Value: 1A, 125 V (AC); LCSC Part #: N/A; Mount: THT; Operating Temperature Max: + 85 C; Operating Temperature Min: - 40 C; Package / Case: 3; Supplier 1: Mouser; Supplier 1 Part Number: N/A; Supplier 2: Digi-Key; Supplier 2 Part Number: N/A; Supplier 3: thegioiic; Supplier 3 Part Number: N/A
footprint 653003117322
pins: 1, 2, 3

## 653004114822
designator P?, comment 1A, 125 V (AC)
WR-WTB THT Male Vertical Shrouded Header, pitch 1.25mm, 4p; Manufacturer: Wurth Elektronik; Manufacturer Part Number: 653004114822; Pin Number: 4; Contact Resistance: 20mOhm; Withstanding Voltage: 250VAC; Working Voltage: 125VAC; ComponentLink1Description: Datasheet; ComponentLink1URL: https://www.we-online.com/catalog/datasheet/653004114822.pdf; Pitch: 1.25mm; Packaging: Tube; Gender: Male; Type: Vertical; Rated Current: 1A; Supplier 1 URL: N/A; Supplier 2 URL: N/A; Supplier 3 URL: N/A; Value: 1A, 125 V (AC); LCSC Part #: N/A; Mount: THT; Operating Temperature Max: + 85 C; Operating Temperature Min: - 40 C; Package / Case: 4; Supplier 1: Mouser; Supplier 1 Part Number: N/A; Supplier 2: Digi-Key; Supplier 2 Part Number: N/A; Supplier 3: thegioiic; Supplier 3 Part Number: N/A
footprint 653004114822
pins: 1, 2, 3, 4

## 653004117322
designator P?, comment 1A, 125 V (AC)
WR-WTB THT Male Horizontal Shrouded Header, pitch 1.25mm, 4p; Manufacturer: Wurth Elektronik; Manufacturer Part Number: 653004117322; Pin Number: 4; Contact Resistance: 20mOhm; Withstanding Voltage: 250VAC; Working Voltage: 125VAC; ComponentLink1Description: Datasheet; ComponentLink1URL: https://www.we-online.com/catalog/datasheet/653004117322.pdf; Pitch: 1.25mm; Packaging: Tube; Gender: Male; Type: Horizontal; Rated Current: 1A; Supplier 1 URL: N/A; Supplier 2 URL: N/A; Supplier 3 URL: N/A; Value: 1A, 125 V (AC); LCSC Part #: N/A; Mount: THT; Operating Temperature Max: + 85 C; Operating Temperature Min: - 40 C; Package / Case: 4; Supplier 1: Mouser; Supplier 1 Part Number: N/A; Supplier 2: Digi-Key; Supplier 2 Part Number: N/A; Supplier 3: thegioiic; Supplier 3 Part Number: N/A
footprint 653004117322
pins: 1, 2, 3, 4

## 653005114822
designator P?, comment 1A, 125 V (AC)
WR-WTB THT Male Vertical Shrouded Header, pitch 1.25mm, 5p; Manufacturer: Wurth Elektronik; Manufacturer Part Number: 653005114822; Pin Number: 5; Contact Resistance: 20mOhm; Withstanding Voltage: 250VAC; Working Voltage: 125VAC; ComponentLink1Description: Datasheet; ComponentLink1URL: https://www.we-online.com/catalog/datasheet/653005114822.pdf; Pitch: 1.25mm; Packaging: Tube; Gender: Male; Type: Vertical; Rated Current: 1A; Supplier 1 URL: N/A; Supplier 2 URL: N/A; Supplier 3 URL: N/A; Value: 1A, 125 V (AC); LCSC Part #: N/A; Mount: THT; Operating Temperature Max: + 85 C; Operating Temperature Min: - 40 C; Package / Case: 5; Supplier 1: Mouser; Supplier 1 Part Number: N/A; Supplier 2: Digi-Key; Supplier 2 Part Number: N/A; Supplier 3: thegioiic; Supplier 3 Part Number: N/A
footprint 653005114822
pins: 1, 2, 3, 4, 5

## 653005117322
designator P?, comment 1A, 125 V (AC)
WR-WTB THT Male Horizontal Shrouded Header, pitch 1.25mm, 5p; Manufacturer: Wurth Elektronik; Manufacturer Part Number: 653005117322; Pin Number: 5; Contact Resistance: 20mOhm; Withstanding Voltage: 250VAC; Working Voltage: 125VAC; ComponentLink1Description: Datasheet; ComponentLink1URL: https://www.we-online.com/catalog/datasheet/653005117322.pdf; Pitch: 1.25mm; Packaging: Tube; Gender: Male; Type: Horizontal; Rated Current: 1A; Supplier 1 URL: N/A; Supplier 2 URL: N/A; Supplier 3 URL: N/A; Value: 1A, 125 V (AC); LCSC Part #: N/A; Mount: THT; Operating Temperature Max: + 85 C; Operating Temperature Min: - 40 C; Package / Case: 5; Supplier 1: Mouser; Supplier 1 Part Number: N/A; Supplier 2: Digi-Key; Supplier 2 Part Number: N/A; Supplier 3: thegioiic; Supplier 3 Part Number: N/A
footprint 653005117322
pins: 1, 2, 3, 4, 5

## 653006114822
designator P?, comment 1A, 125 V (AC)
WR-WTB THT Male Vertical Shrouded Header, pitch 1.25mm, 6p; Manufacturer: Wurth Elektronik; Manufacturer Part Number: 653006114822; Pin Number: 6; Contact Resistance: 20mOhm; Withstanding Voltage: 250VAC; Working Voltage: 125VAC; ComponentLink1Description: Datasheet; ComponentLink1URL: https://www.we-online.com/catalog/datasheet/653006114822.pdf; Pitch: 1.25mm; Packaging: Tube; Gender: Male; Type: Vertical; Rated Current: 1A; Supplier 1 URL: N/A; Supplier 2 URL: N/A; Supplier 3 URL: N/A; Value: 1A, 125 V (AC); LCSC Part #: N/A; Mount: THT; Operating Temperature Max: + 85 C; Operating Temperature Min: - 40 C; Package / Case: 6; Supplier 1: Mouser; Supplier 1 Part Number: N/A; Supplier 2: Digi-Key; Supplier 2 Part Number: N/A; Supplier 3: thegioiic; Supplier 3 Part Number: N/A
footprint 653006114822
pins: 1, 2, 3, 4, 5, 6

## 653006117322
designator P?, comment 1A, 125 V (AC)
WR-WTB THT Male Horizontal Shrouded Header, pitch 1.25mm, 6p; Manufacturer: Wurth Elektronik; Manufacturer Part Number: 653006117322; Pin Number: 6; Contact Resistance: 20mOhm; Withstanding Voltage: 250VAC; Working Voltage: 125VAC; ComponentLink1Description: Datasheet; ComponentLink1URL: https://www.we-online.com/catalog/datasheet/653006117322.pdf; Pitch: 1.25mm; Packaging: Tube; Gender: Male; Type: Horizontal; Rated Current: 1A; Supplier 1 URL: N/A; Supplier 2 URL: N/A; Supplier 3 URL: N/A; Value: 1A, 125 V (AC); LCSC Part #: N/A; Mount: THT; Operating Temperature Max: + 85 C; Operating Temperature Min: - 40 C; Package / Case: 6; Supplier 1: Mouser; Supplier 1 Part Number: N/A; Supplier 2: Digi-Key; Supplier 2 Part Number: N/A; Supplier 3: thegioiic; Supplier 3 Part Number: N/A
footprint 653006117322
pins: 1, 2, 3, 4, 5, 6

## 653007114822
designator P?, comment 1A, 125 V (AC)
WR-WTB THT Male Vertical Shrouded Header, pitch 1.25mm, 7p; Manufacturer: Wurth Elektronik; Manufacturer Part Number: 653007114822; Pin Number: 7; Contact Resistance: 20mOhm; Withstanding Voltage: 250VAC; Working Voltage: 125VAC; ComponentLink1Description: Datasheet; ComponentLink1URL: https://www.we-online.com/catalog/datasheet/653007114822.pdf; Pitch: 1.25mm; Packaging: Tube; Gender: Male; Type: Vertical; Rated Current: 1A; Supplier 1 URL: N/A; Supplier 2 URL: N/A; Supplier 3 URL: N/A; Value: 1A, 125 V (AC); LCSC Part #: N/A; Mount: THT; Operating Temperature Max: + 85 C; Operating Temperature Min: - 40 C; Package / Case: 7; Supplier 1: Mouser; Supplier 1 Part Number: N/A; Supplier 2: Digi-Key; Supplier 2 Part Number: N/A; Supplier 3: thegioiic; Supplier 3 Part Number: N/A
footprint 653007114822
pins: 1, 2, 3, 4, 5, 6, 7

## 653007117322
designator P?, comment 1A, 125 V (AC)
WR-WTB THT Male Horizontal Shrouded Header, pitch 1.25mm, 7p; Manufacturer: Wurth Elektronik; Manufacturer Part Number: 653007117322; Pin Number: 7; Contact Resistance: 20mOhm; Withstanding Voltage: 250VAC; Working Voltage: 125VAC; ComponentLink1Description: Datasheet; ComponentLink1URL: https://www.we-online.com/catalog/datasheet/653007117322.pdf; Pitch: 1.25mm; Packaging: Tube; Gender: Male; Type: Horizontal; Rated Current: 1A; Supplier 1 URL: N/A; Supplier 2 URL: N/A; Supplier 3 URL: N/A; Value: 1A, 125 V (AC); LCSC Part #: N/A; Mount: THT; Operating Temperature Max: + 85 C; Operating Temperature Min: - 40 C; Package / Case: 7; Supplier 1: Mouser; Supplier 1 Part Number: N/A; Supplier 2: Digi-Key; Supplier 2 Part Number: N/A; Supplier 3: thegioiic; Supplier 3 Part Number: N/A
footprint 653007117322
pins: 1, 2, 3, 4, 5, 6, 7

## 653008114822
designator P?, comment 1A, 125 V (AC)
WR-WTB THT Male Vertical Shrouded Header, pitch 1.25mm, 8p; Manufacturer: Wurth Elektronik; Manufacturer Part Number: 653008114822; Pin Number: 8; Contact Resistance: 20mOhm; Withstanding Voltage: 250VAC; Working Voltage: 125VAC; ComponentLink1Description: Datasheet; ComponentLink1URL: https://www.we-online.com/catalog/datasheet/653008114822.pdf; Pitch: 1.25mm; Packaging: Tube; Gender: Male; Type: Vertical; Rated Current: 1A; Supplier 1 URL: N/A; Supplier 2 URL: N/A; Supplier 3 URL: N/A; Value: 1A, 125 V (AC); LCSC Part #: N/A; Mount: THT; Operating Temperature Max: + 85 C; Operating Temperature Min: - 40 C; Package / Case: 8; Supplier 1: Mouser; Supplier 1 Part Number: N/A; Supplier 2: Digi-Key; Supplier 2 Part Number: N/A; Supplier 3: thegioiic; Supplier 3 Part Number: N/A
footprint 653008114822
pins: 1, 2, 3, 4, 5, 6, 7, 8

## 653008117322
designator P?, comment 1A, 125 V (AC)
WR-WTB THT Male Horizontal Shrouded Header, pitch 1.25mm, 8p; Manufacturer: Wurth Elektronik; Manufacturer Part Number: 653008117322; Pin Number: 8; Contact Resistance: 20mOhm; Withstanding Voltage: 250VAC; Working Voltage: 125VAC; ComponentLink1Description: Datasheet; ComponentLink1URL: https://www.we-online.com/catalog/datasheet/653008117322.pdf; Pitch: 1.25mm; Packaging: Tube; Gender: Male; Type: Horizontal; Rated Current: 1A; Supplier 1 URL: N/A; Supplier 2 URL: N/A; Supplier 3 URL: N/A; Value: 1A, 125 V (AC); LCSC Part #: N/A; Mount: THT; Operating Temperature Max: + 85 C; Operating Temperature Min: - 40 C; Package / Case: 8; Supplier 1: Mouser; Supplier 1 Part Number: N/A; Supplier 2: Digi-Key; Supplier 2 Part Number: N/A; Supplier 3: thegioiic; Supplier 3 Part Number: N/A
footprint 653008117322
pins: 1, 2, 3, 4, 5, 6, 7, 8

## 653009114822
designator P?, comment 1A, 125 V (AC)
WR-WTB THT Male Vertical Shrouded Header, pitch 1.25mm, 9p; Manufacturer: Wurth Elektronik; Manufacturer Part Number: 653009114822; Pin Number: 9; Contact Resistance: 20mOhm; Withstanding Voltage: 250VAC; Working Voltage: 125VAC; ComponentLink1Description: Datasheet; ComponentLink1URL: https://www.we-online.com/catalog/datasheet/653009114822.pdf; Pitch: 1.25mm; Packaging: Tube; Gender: Male; Type: Vertical; Rated Current: 1A; Supplier 1 URL: N/A; Supplier 2 URL: N/A; Supplier 3 URL: N/A; Value: 1A, 125 V (AC); LCSC Part #: N/A; Mount: THT; Operating Temperature Max: + 85 C; Operating Temperature Min: - 40 C; Package / Case: 9; Supplier 1: Mouser; Supplier 1 Part Number: N/A; Supplier 2: Digi-Key; Supplier 2 Part Number: N/A; Supplier 3: thegioiic; Supplier 3 Part Number: N/A
footprint 653009114822
pins: 1, 2, 3, 4, 5, 6, 7, 8, 9

## 653009117322
designator P?, comment 1A, 125 V (AC)
WR-WTB THT Male Horizontal Shrouded Header, pitch 1.25mm, 9p; Manufacturer: Wurth Elektronik; Manufacturer Part Number: 653009117322; Pin Number: 9; Contact Resistance: 20mOhm; Withstanding Voltage: 250VAC; Working Voltage: 125VAC; ComponentLink1Description: Datasheet; ComponentLink1URL: https://www.we-online.com/catalog/datasheet/653009117322.pdf; Pitch: 1.25mm; Packaging: Tube; Gender: Male; Type: Horizontal; Rated Current: 1A; Supplier 1 URL: N/A; Supplier 2 URL: N/A; Supplier 3 URL: N/A; Value: 1A, 125 V (AC); LCSC Part #: N/A; Mount: THT; Operating Temperature Max: + 85 C; Operating Temperature Min: - 40 C; Package / Case: 9; Supplier 1: Mouser; Supplier 1 Part Number: N/A; Supplier 2: Digi-Key; Supplier 2 Part Number: N/A; Supplier 3: thegioiic; Supplier 3 Part Number: N/A
footprint 653009117322
pins: 1, 2, 3, 4, 5, 6, 7, 8, 9

## 653010114822
designator P?, comment 1A, 125 V (AC)
WR-WTB THT Male Vertical Shrouded Header, pitch 1.25mm, 10p; Manufacturer: Wurth Elektronik; Manufacturer Part Number: 653010114822; Pin Number: 10; Contact Resistance: 20mOhm; Withstanding Voltage: 250VAC; Working Voltage: 125VAC; ComponentLink1Description: Datasheet; ComponentLink1URL: https://www.we-online.com/catalog/datasheet/653010114822.pdf; Pitch: 1.25mm; Packaging: Tube; Gender: Male; Type: Vertical; Rated Current: 1A; Supplier 1 URL: N/A; Supplier 2 URL: N/A; Supplier 3 URL: N/A; Value: 1A, 125 V (AC); LCSC Part #: N/A; Mount: THT; Operating Temperature Max: + 85 C; Operating Temperature Min: - 40 C; Package / Case: 10; Supplier 1: Mouser; Supplier 1 Part Number: N/A; Supplier 2: Digi-Key; Supplier 2 Part Number: N/A; Supplier 3: thegioiic; Supplier 3 Part Number: N/A
footprint 653010114822
pins: 1, 2, 3, 4, 5, 6, 7, 8, 9, 10

## 653010117322
designator P?, comment 1A, 125 V (AC)
WR-WTB THT Male Horizontal Shrouded Header, pitch 1.25mm, 10p; Manufacturer: Wurth Elektronik; Manufacturer Part Number: 653010117322; Pin Number: 10; Contact Resistance: 20mOhm; Withstanding Voltage: 250VAC; Working Voltage: 125VAC; ComponentLink1Description: Datasheet; ComponentLink1URL: https://www.we-online.com/catalog/datasheet/653010117322.pdf; Pitch: 1.25mm; Packaging: Tube; Gender: Male; Type: Horizontal; Rated Current: 1A; Supplier 1 URL: N/A; Supplier 2 URL: N/A; Supplier 3 URL: N/A; Value: 1A, 125 V (AC); LCSC Part #: N/A; Mount: THT; Operating Temperature Max: + 85 C; Operating Temperature Min: - 40 C; Package / Case: 10; Supplier 1: Mouser; Supplier 1 Part Number: N/A; Supplier 2: Digi-Key; Supplier 2 Part Number: N/A; Supplier 3: thegioiic; Supplier 3 Part Number: N/A
footprint 653010117322
pins: 1, 2, 3, 4, 5, 6, 7, 8, 9, 10